# Altium schematic symbol library SC39-11SURKWA.SchLib: 1 symbol
Pins are listed as number, name and electrical type; pins without a type are passive.

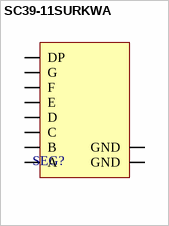
[diagram p0: symbol SC39-11SURKWA]

## SC39-11SURKWA
designator SEG?
pins: 1 G, 2 F, 3 GND, 4 E, 5 D, 6 DP, 7 C, 8 GND, 9 B, 10 A